# Altium footprint library Pback_PCB.PcbLib: 2 footprints
Each footprint in its own frame and in the unit in brackets; x right, y up, seen from the top. Pads: shape width x height; smd on the part's side, far side on the other; paste and mask are expansions set on the pad; w line width, h text height; cw(c..) or ccw(c..) is an arc to the next point about the centre after c.
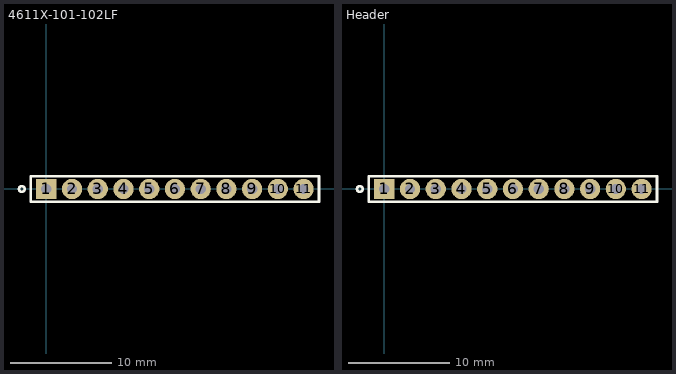
[diagram p0: the footprints below, top view; thin cyan lines are the x and y axes]

## 4611X-101-102LF [mm]
pads (11):
  rect 2x2 hole 1.02: 1(0,0)
  round 2 hole 1.02: 2(2.54,0) 3(5.08,0) 4(7.62,0) 5(10.16,0) 6(12.7,0) 7(15.24,0) 8(17.78,0) 9(20.32,0) 10(22.86,0) 11(25.4,0)
Top Overlay:
  circle w0.254: c-2.413,0 r0.284
  lines w0.254: -1.524,-1.27 26.924,-1.27 26.924,1.27 -1.524,1.27 -1.524,-1.27
3D body "4611x.stp": height 4.95, standoff -3.43, extent -1.245,-1.214 26.645,1.27

## Header [mm]
pads (11):
  rect 2x2 hole 1.02: 1(0,0)
  round 2 hole 1.02: 2(2.54,0) 3(5.08,0) 4(7.62,0) 5(10.16,0) 6(12.7,0) 7(15.24,0) 8(17.78,0) 9(20.32,0) 10(22.86,0) 11(25.4,0)
Top Overlay:
  circle w0.254: c-2.413,0 r0.284
  lines w0.254: -1.524,-1.27 26.924,-1.27 26.924,1.27 -1.524,1.27 -1.524,-1.27
3D body "_ _ _C111LFBN-RC.STEP": height 8.5, standoff -3.2, extent -1.524,-1.27 26.916,1.27